# EAGLE library part FREESCALE-BDM (library madhu)
Freescale BDM connector
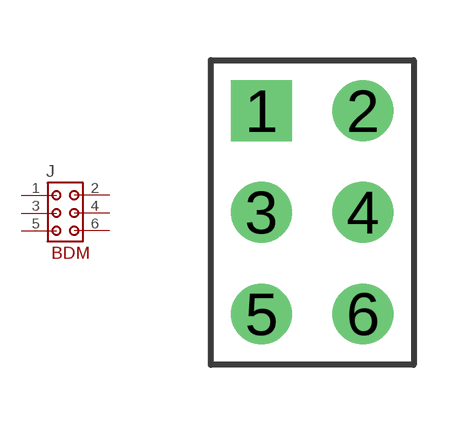
[diagram p8: symbol with the pads of FREESCALE-BDM; footprint FREESCALE-BDM]

Designator prefix J

## FREESCALE-BDM6-PIN  [FREESCALE-BDM]
1  1
2  2
3  3
4  4
5  5
6  6

## Footprint FREESCALE-BDM (pad centres in mm)
Freescale BDM connector grid 2.5 mm, outline 2.4 x 4.4 mm
drill 1.016 square: 1 -1.27,2.54
drill 1.016: 2 1.27,2.54; 3 -1.27,0; 4 1.27,0; 5 -1.27,-2.54; 6 1.27,-2.54